# Altium schematic symbol library Schottky_30V.SchLib: 1 symbol
Pins are listed as number, name and electrical type; pins without a type are passive.

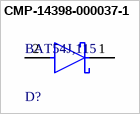
[diagram p0: symbol CMP-14398-000037-1]

## CMP-14398-000037-1
designator D?, comment BAT54J,115
DIODE SCHOTTKY 30V 200MA SOD323F; RoHS Compliant: Yes
footprint FP-SOD323F-MFG
pins: 1 C, 2 A